# Altium integrated library MMBTA06LT3G.IntLib: 1 symbol
Pins are listed as number, name and electrical type; pins without a type are passive.

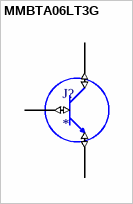
[diagram p0: symbol MMBTA06LT3G]

## MMBTA06LT3G
designator J?
Bipolar (BJT) Transistor NPN 80 V 500 mA 100MHz 225 mW Surface Mount SOT-23-3 (TO-236); MF: ON Semiconductor; MP: MMBTA06LT3G; SnapEDA_Link: https://www.snapeda.com/parts/MMBTA06LT3G/Onsemi/view-part/?ref=snap; Package: SOT-23-3 ON Semiconductor; Value: *; Check_prices: https://www.snapeda.com/parts/MMBTA06LT3G/Onsemi/view-part/?ref=eda
footprint SOT-23
pins: BASE (io), COLLECTOR (io), EMITTER (io)